# EAGLE library part MAX31856-MODULE (library moto-anomaly)
MAX31856-MODULE MAX31856 termokupl (K-tip EGT) amplifikatoru, SPI. Kart: 20.0 x 25.0 mm - Guven: L STEP: GrabCAD 'MAX31856 breakout' NOT: Genel klon pin sirasi; Adafruit kartinda VIN/3Vo ek pinleri var.
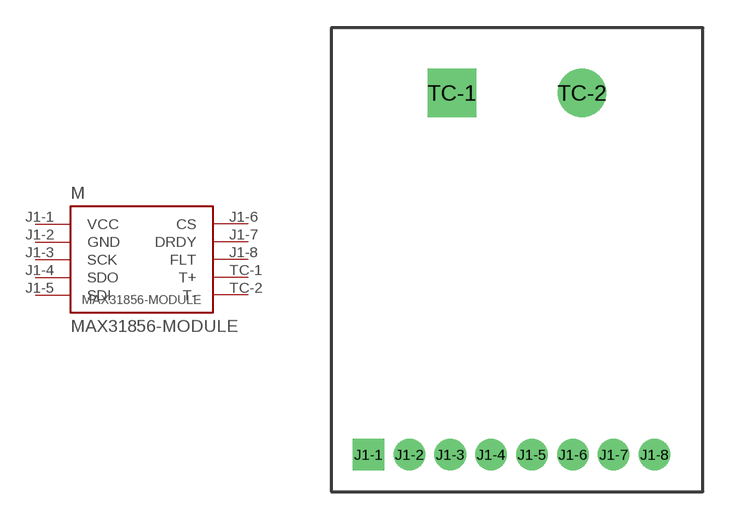
[diagram p3: symbol with the pads of MAX31856-MODULE; footprint MAX31856-MODULE]

Designator prefix M

## MAX31856-MODULE (BOARD_SIZE: 20.0x25.0mm; CONFIDENCE: L)  [MAX31856-MODULE]
J1-1  VCC  pas
J1-2  GND  pas
J1-3  SCK  pas
J1-4  SDO  pas
J1-5  SDI  pas
J1-6  CS  pas
J1-7  DRDY  pas
J1-8  FLT  pas
TC-1  T+  pas
TC-2  T-  pas

## Footprint MAX31856-MODULE (pad centres in mm)
MAX31856 termokupl (K-tip EGT) amplifikatoru, SPI. | Kart: 20.0 x 25.0 mm | Guven: L
drill 1 pad 1.7 square: J1-1 -8,-10.5
drill 1 pad 1.7 round: J1-2 -5.8,-10.5; J1-3 -3.6,-10.5; J1-4 -1.4,-10.5; J1-5 0.8,-10.5; J1-6 3,-10.5; J1-7 5.2,-10.5; J1-8 7.4,-10.5
drill 1.3 pad 2.6 square: TC-1 -3.5,9
drill 1.3 pad 2.6 round: TC-2 3.5,9